# Altium integrated library 1817699.IntLib: 1 symbol
Pins are listed as number, name and electrical type; pins without a type are passive.

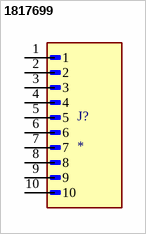
[diagram p0: symbol 1817699]

## 1817699
designator J?
MP: 1817699; Package: None; Price: None; Value: *; Availability: Unavailable
footprint PHOENIX_1817699
pins: 1, 2, 3, 4, 5, 6, 7, 8, 9, 10